# Altium footprint library Gateway_Academic.PcbLib: 23 footprints (part 2 of 2)
Each footprint in its own frame and in the unit in brackets; x right, y up, seen from the top. Pads: shape width x height; smd on the part's side, far side on the other; paste and mask are expansions set on the pad; w line width, h text height; cw(c..) or ccw(c..) is an arc to the next point about the centre after c.
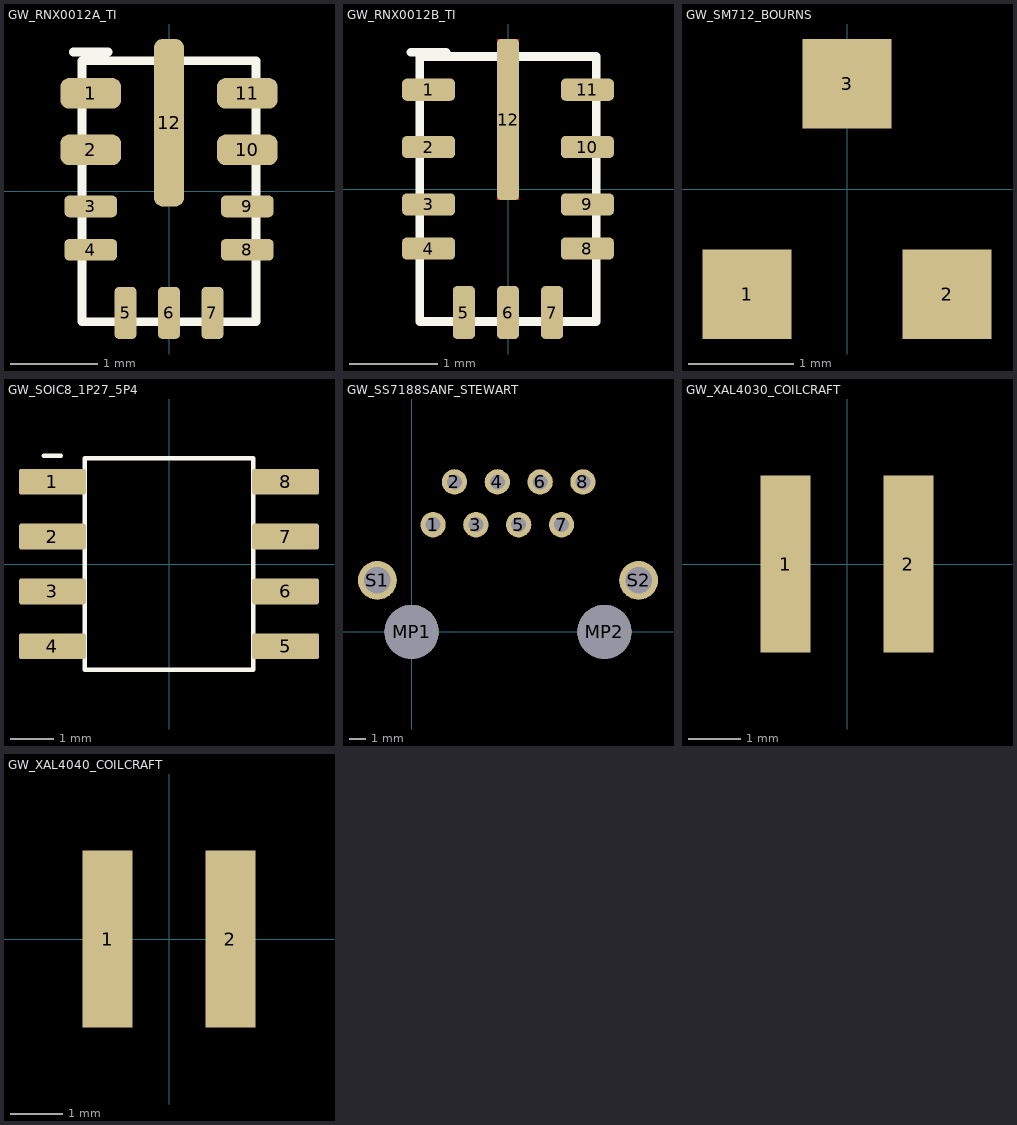
[diagram p1: the footprints below, top view; thin cyan lines are the x and y axes]

## GW_RNX0012A_TI [mm] "SNVSB49D p4; RNX0012A 4222858/A PDF pp44-46 and RNX0012B 4223969/C pp47-49; Confirm actual RNX revision before use. Pin12 SW: no ground tab. Paste12 suppressed, two .25x.812mm windows at y=.2815,1.2935 per drawing; 0.125mm stencil."
pads (12):
  rrect57% 0.7x0.35 smd paste+0 mask-0.05: 1(-0.9,1.125) 2(-0.9,0.475) 10(0.9,0.475) 11(0.9,1.125)
  rrect40% 0.6x0.25 smd paste+0 mask+0.05: 3(-0.9,-0.175) 4(-0.9,-0.675) 8(0.9,-0.675) 9(0.9,-0.175)
  rrect40% 0.25x0.6 smd paste+0 mask+0.05: 5(-0.5,-1.4) 6(0,-1.4) 7(0.5,-1.4)
  rrect57% 0.35x1.925 smd paste-1 mask-0.05: 12(0,0.787)
Top Layer:
  rectangle: -0.125,-0.125 0.125,0.687
  rectangle: -0.125,0.887 0.125,1.699
Top Overlay:
  lines w0.1: -1.1,1.6 -0.7,1.6 ; -1,-1.5 1,-1.5 1,1.5 -1,1.5 -1,-1.5

## GW_RNX0012B_TI [mm] "SNVSB49D p4; RNX0012A 4222858/A PDF pp44-46 and RNX0012B 4223969/C pp47-49; Confirm actual RNX revision before use. Pin12 SW: no ground tab. Paste12 suppressed, two .25x.812mm windows at y=.2815,1.2935 per drawing; 0.125mm stencil."
pads (12):
  rrect40% 0.6x0.25 smd paste+0 mask+0.07: 1(-0.9,1.125) 2(-0.9,0.475) 3(-0.9,-0.175) 4(-0.9,-0.675) 8(0.9,-0.675) 9(0.9,-0.175) 10(0.9,0.475) 11(0.9,1.125)
  rrect40% 0.25x0.6 smd paste+0 mask+0.07: 5(-0.5,-1.4) 6(0,-1.4) 7(0.5,-1.4)
  rrect40% 0.25x1.825 smd paste-1 mask+0.07: 12(0,0.787)
Top Layer:
  rectangle: -0.125,-0.125 0.125,0.687
  rectangle: -0.125,0.887 0.125,1.699
Top Overlay:
  lines w0.1: -1.1,1.55 -0.7,1.55 ; -1,-1.5 1,-1.5 1,1.5 -1,1.5 -1,-1.5
  text ".Designator" at 0,2.3 h1

## GW_SM712_BOURNS [mm] "Bourns CDSOT23-SM712 saved2026-11-07 pp1-2 pin diagram and Recommended Footprint; Pins1/2 bus;3 reference. +/-7/12V asymmetric clamp. Not a generic SOT23 substitution."
pads (3):
  rect 0.85x0.85 smd: 1(-0.95,-1) 2(0.95,-1) 3(0,1)

## GW_SOIC8_1P27_5P4 [mm] "SLLSF78B table4-1 p3; D0008A 4214825/C PDF pp30-32; DS20005991B pin table p3; C04-2057-OA RevE p19;"
pads (8):
  rrect17% 1.55x0.6 smd paste+0 mask+0.07: 1(-2.7,1.905) 2(-2.7,0.635) 3(-2.7,-0.635) 4(-2.7,-1.905) 5(2.7,-1.905) 6(2.7,-0.635) 7(2.7,0.635) 8(2.7,1.905)
Top Overlay:
  lines w0.1: -2.9,2.505 -2.5,2.505 ; -1.95,-2.45 1.95,-2.45 1.95,2.45 -1.95,2.45 -1.95,-2.45
  text ".Designator" at 0,2.805 h1

## GW_SS7188SANF_STEWART [mm] "Cinch/Stewart CT710001 revB0 10-Jul-2023 component-side recommended hole layout; Holes/positions from drawing; signal1..8=.89drill, shield1.57, mounts3.2NPTH. Copper lands1.5/2.3 are ENGINEERING CANDIDATES; fab annular ring/finished holes/body edge pending."
pads (12):
  round 1.5 on Top hole 0.889: 1(1.27,6.35) 2(2.54,8.89) 3(3.81,6.35) 4(5.08,8.89) 5(6.35,6.35) 6(7.62,8.89) 7(8.89,6.35) 8(10.16,8.89)
  round 3.2 on Top hole 3.2 unplated: MP1(0,0) MP2(11.43,0)
  round 2.3 on Top hole 1.575: S1(-2.032,3.048) S2(13.462,3.048)

## GW_XAL4030_COILCRAFT [mil] "Coilcraft document806-4 revised02/25/26 Recommended Land Pattern; Terminals assigned project1/2 for nonpolar winding; place high dv/dt at stripe/terminal1. Height 3.1mm. Mask/paste DFM pending."
pads (2):
  rect 38x134 smd: 1(-46.5,0) 2(46.5,0)

## GW_XAL4040_COILCRAFT [mil] "Coilcraft document806-4 revised02/25/26 Recommended Land Pattern; Terminals assigned project1/2 for nonpolar winding; place high dv/dt at stripe/terminal1. Height 4.1mm. Mask/paste DFM pending."
pads (2):
  rect 38x134 smd: 1(-46.5,0) 2(46.5,0)